# Altium schematic symbol library NRS8040T4R7NJGJ.SchLib: 1 symbol
Pins are listed as number, name and electrical type; pins without a type are passive.

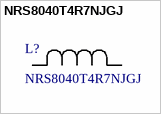
[diagram p0: symbol NRS8040T4R7NJGJ]

## NRS8040T4R7NJGJ
designator L?
No Description Available; Manufacturer_Name: TAIYO YUDEN; Copyright: Copyright (C) 2026 Ultra Librarian. All rights reserved.; Manufacturer_Part_Number: NRS8040T4R7NJGJ
footprint IND_TAIYO_NRS8040_TAY
pins: 1, 2